# Altium schematic symbol library VJ0805Y104KXAAT.SchLib: 1 symbol
Pins are listed as number, name and electrical type; pins without a type are passive.

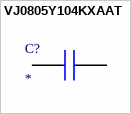
[diagram p0: symbol VJ0805Y104KXAAT]

## VJ0805Y104KXAAT
designator C?
0.1 µF ±5% 50V Ceramic Capacitor X7R 0805 (2012 Metric); MF: Vishay Vitramon; MP: VJ0805Y104KXAAT; SnapEDA_Link: https://www.snapeda.com/parts/VJ0805Y104KXAAT/Vishay/view-part/?ref=snap; Package: 2012 Vishay Vitramon; Value: *; Check_prices: https://www.snapeda.com/parts/VJ0805Y104KXAAT/Vishay/view-part/?ref=eda
footprint CAPC2012X145N
footprint CAPC2012X145N
pins: 1, 2